# Altium schematic symbol library LED-Optocupler.SchLib: 114 symbols (part 2 of 2)
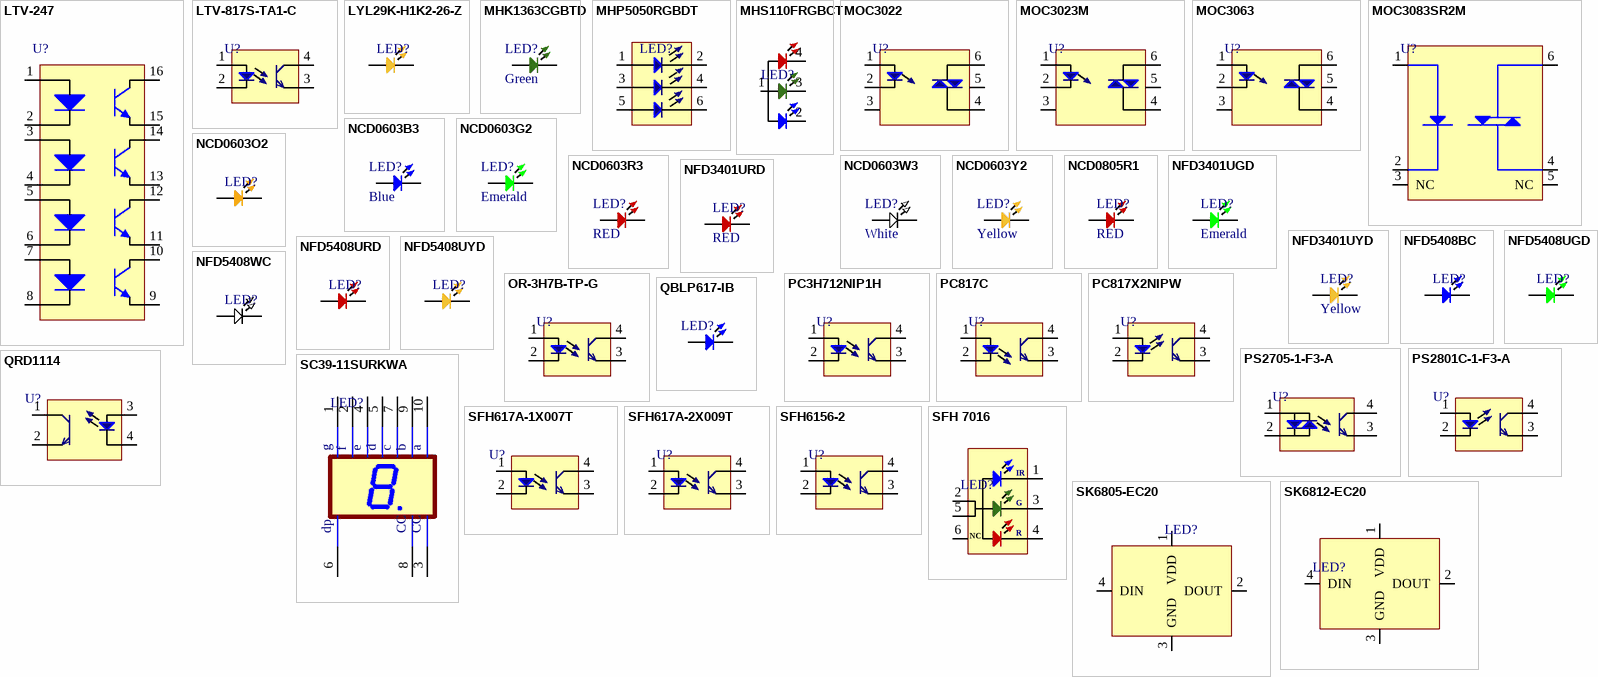
[diagram p3: symbols LTV-247 to SK6812-EC20]

## NCD0603O2
designator LED?
20mA 100mcd~220mcd 600nm~610nm -30℃~+85℃ Orange 130° 65mW 1.6V~2.6V 0603 Light Emitting Diodes (LED) ROHS; Manufacturer: FOSHAN Nationstar Optoelectronics; Manufacturer Part Number: NCD0603O2; Supplier: LCSC; LCSC Part Number: C108553; RoHS: No; Item Type: LED
footprint LED-0603
pins: 1, 2

## NCD0603R3
designator LED?, comment RED
RED LED 0603 Light Emitting Diodes; Manufacturer: Foshan NationStar Optoelectronics; Manufacturer Part Number: NCD0603R3; Package: 0603; Item Type: LED; LCSC Part Number: C3151730; ComponentLink1Description: LCSC; ComponentLink1URL: https://www.lcsc.com/product-detail/Light-Emitting-Diodes-LED_Foshan-NationStar-Optoelectronics-NCD0603R3_C3151730.html
footprint LED-0603
pins: 1, 2

## NCD0603W3
designator LED?, comment White
White light 0603 Light Emitting Diodes (LED) ROHS; Manufacturer: Foshan NationStar Optoelectronics; Manufacturer Part Number: NCD0603W3; Package: 0603; LCSC Part Number: C158100; Item Type: LED; ComponentLink1Description: LCSC; ComponentLink1URL: https://www.lcsc.com/product-detail/Light-Emitting-Diodes-LED_Foshan-NationStar-Optoelectronics-NCD0603W3_C158100.html
footprint LED-0603
pins: 1, 2

## NCD0603Y2
designator LED?, comment Yellow
yellow 0603 Light Emitting Diodes (LED) ROHS; Manufacturer: Foshan NationStar Optoelectronics; Manufacturer Part Number: NCD0603Y2; Package: 0603; LCSC Part Number: C89811; Item Type: LED; ComponentLink1Description: LCSC; ComponentLink1URL: https://www.lcsc.com/product-detail/Light-Emitting-Diodes-LED_Foshan-NationStar-Optoelectronics-NCD0603Y2_C89811.html
footprint LED-0603
pins: 1, 2

## NCD0805R1
designator LED?, comment RED
20mA 无色透明透镜 67mcd~195mcd -30℃~+85℃ 615nm~630nm 独立二极管 Red 130° 65mW 1.6V~2.6V 0805 Light Emitting Diodes (LED) ROHS; Manufacturer: FOSHAN Nationstar Optoelectronics; Manufacturer Part Number: NCD0805R1; Supplier: LCSC; LCSC Part Number: C84256; RoHS: No; Item Type: LED
footprint LED-0805
pins: 1, 2

## NFD3401UGD
designator LED?, comment Emerald
515nm~525nm -30℃~+85℃ Emerald 30° 200mW Plugin,D=3mm Light Emitting Diodes (LED) ROHS; Manufacturer: Foshan NationStar Optoelectronics; Manufacturer Part Number: NFD3401UGD; Package: Plugin,D=3mm; LCSC Part Number: C20618151; Item Type: LED; ComponentLink1Description: LCSC; ComponentLink1URL: https://www.lcsc.com/product-detail/Light-Emitting-Diodes-LED_Foshan-NationStar-Optoelectronics-NFD3401URD_C20618148.html
footprint TH LED 3mm_
pins: 1 -, 2 +

## NFD3401URD
designator LED?, comment RED
620nm~630nm -30℃~+85℃ Red 30° 200mW Plugin,D=3mm Light Emitting Diodes (LED) ROHS; Manufacturer: Foshan NationStar Optoelectronics; Manufacturer Part Number: NFD3401URD; Package: Plugin,D=3mm; LCSC Part Number: C20618148; Item Type: LED; ComponentLink1Description: LCSC; ComponentLink1URL: https://www.lcsc.com/product-detail/Light-Emitting-Diodes-LED_Foshan-NationStar-Optoelectronics-NFD3401URD_C20618148.html
footprint TH LED Red 3MM
pins: 1, 2

## NFD3401UYD
designator LED?, comment Yellow
585nm~595nm -30℃~+85℃ Yellow 30° 200mW Plugin,D=3mm Light Emitting Diodes (LED) ROHS; Manufacturer: Foshan NationStar Optoelectronics; Manufacturer Part Number: NFD3401UYD; Package: Plugin,D=3mm; LCSC Part Number: C20618149; Item Type: LED; ComponentLink1Description: LCSC; ComponentLink1URL: https://www.lcsc.com/product-detail/Light-Emitting-Diodes-LED_Foshan-NationStar-Optoelectronics-NFD3401UYD_C20618149.html
footprint TH LED Yellow 3MM
pins: 1, 2

## NFD5408BC
designator LED?
460nm~470nm -30℃~+85℃ Blue 20° 200mW Plugin,D=5mm LED Indication - Discrete ROHS; Manufacturer: Foshan; Manufacturer Part Number: NFD5408BC; Package: Plugin,D=5mm; LCSC Part Number: C20618158; Item Type: LED; ComponentLink1Description: LCSC; ComponentLink1URL: https://www.lcsc.com/product-detail/LED-Indication-Discrete_Foshan-NationStar-Optoelectronics-NFD5408BC_C20618158.html
footprint TH LED 5mm Blue
pins: 1, 2

## NFD5408UGD
designator LED?
515nm~525nm -30℃~+85℃ Emerald 30° 200mW Plugin,D=5mm LED Indication - Discrete ROHS; Manufacturer: Foshan; Manufacturer Part Number: NFD5408UGD; Package: Plugin,D=5mm; LCSC Part Number: C20618157; Item Type: LED; ComponentLink1Description: LCSC; ComponentLink1URL: https://www.lcsc.com/product-detail/LED-Indication-Discrete_Foshan-NationStar-Optoelectronics-NFD5408UGD_C20618157.html
footprint TH LED 5mm Green
pins: 1, 2

## NFD5408URD
designator LED?
620nm~630nm -30℃~+85℃ Red 30° 200mW Plugin,D=5mm LED Indication - Discrete ROHS; Manufacturer: Foshan; Manufacturer Part Number: NFD5408URD; Package: Plugin,D=5mm; LCSC Part Number: C20618154; Item Type: LED; ComponentLink1Description: LCSC; ComponentLink1URL: https://www.lcsc.com/product-detail/LED-Indication-Discrete_Foshan-NationStar-Optoelectronics-NFD5408URD_C20618154.html
footprint TH LED 5mm_
pins: 1, 2

## NFD5408UYD
designator LED?
585nm~595nm -30℃~+85℃ Yellow 30° 200mW Plugin,D=5mm LED Indication - Discrete ROHS; Manufacturer: Foshan; Manufacturer Part Number: NFD5408UYD; Package: Plugin,D=5mm; LCSC Part Number: C20618155; Item Type: LED; ComponentLink1Description: LCSC; ComponentLink1URL: https://www.lcsc.com/product-detail/LED-Indication-Discrete_Foshan-NationStar-Optoelectronics-NFD5408UYD_C20618155.html
footprint TH LED 5mm Yellow
pins: 1, 2

## NFD5408WC
designator LED?
-30℃~+85℃ White 20° 200mW Plugin,D=5mm LED Indication - Discrete ROHS; Manufacturer: Foshan; Manufacturer Part Number: NFD5408WC; Package: Plugin,D=5mm; LCSC Part Number: C20618159; Item Type: LED; ComponentLink1Description: LCSC; ComponentLink1URL: https://www.lcsc.com/product-detail/LED-Indication-Discrete_Foshan-NationStar-Optoelectronics-NFD5408WC_C20618159.html
footprint TH LED 5mm White
pins: 1, 2

## OR-3H7B-TP-G
designator U?
80V 3750V 2us@2mA,100Ω -55℃~+125℃ 50mA 3us@2mA,100Ω 0.4V@2.4mA,8mA 1 6V 1.2V Phototransistor DC SOP-4-2.6mm Optocouplers - Phototransistor Output ROHS; Manufacturer: Orient; Manufacturer Part Number: OR-3H7B-TP-G; Package: SOP-4-2.6mm; LCSC Part Number: C282477; Item Type: Optocoupler; ComponentLink1Description: LCSC; ComponentLink1URL: https://www.lcsc.com/product-detail/Optocouplers-Phototransistor-Output_Orient-OR-3H7B-TP-G_C282477.html
footprint SOP-4-1.27mm pitch Body 2.6mm
pins: 1 An, 2 Ca, 3 E, 4 C

## PC3H712NIP1H
designator U?
OPTOISO 2.5KV TRANS 4-MINI-FLAT; Manufacturer: Sharp; Manufacturer Part Number: PC3H712NIP1H; Item Type: Optocouplers; Collector Emitter Breakdown Voltage: 80V; Current Transfer Ratio: 500%; Dark Current: 100nA; Forward Current: 10mA; Number of Elements: 1; Supplier: Arrow Electronics; LCSC Part Number: C17651788; RoHS: Compliant; Stock: 14000; Pricing: 10500=0.3023, 14000=0.301 (USD); Contact Plating: Tin Bismuth; Isolation Voltage: 2.5kV; Lifecycle Status: Production; Max Operating Temperature: 100°C; Min Operating Temperature: -30°C; REACH SVHC: Yes; ComponentLink1URL: https://datasheet.octopart.com:443/PC3H712NIP1H-Sharp-datasheet-180743902.pdf?src-supplier=IHS; ComponentLink1Description: https://datasheet.octopart.com:443/PC3H712NIP1H-Sharp-datasheet-180743902.pdf?src-supplier=IHS; ComponentLink2URL: https://datasheet.octopart.com:443/PC3H712NIP1H-SOCLE-Technology-datasheet-109991809.pdf?src-supplier=Future+Electronics; ComponentLink2Description: https://datasheet.octopart.com:443/PC3H712NIP1H-SOCLE-Technology-datasheet-109991809.pdf?src-supplier=Future+Electronics
footprint PC3H712NIP1H
pins: 1 An, 2 Ca, 3 E, 4 C

## PC817C
designator U?
70V 5kV 50mA 100mV@1mA,20mA 1 6V 1.2V DC SMD-4 Transistor Output Optocoupler ROHS; Manufacturer: Slkor; Manufacturer Part Number: PC817C; Item Type: IC; Package: SMD-4; LCSC Part Number: C2936043; ComponentLink1Description: LCSC; ComponentLink1URL: https://www.lcsc.com/product-detail/Transistor-Output-Optocoupler_Slkor-SLKORMICRO-Elec-PC817C_C2936043.html
footprint PC817C
pins: 1 An, 2 Ca, 3 E, 4 C

## PC817X2NIPW
designator U?
Optoisolator Output Channel 4-SMD; Manufacturer: Sharp; Manufacturer Part Number: PC817X2NIPW; Item Type: IC; Supplier: Mouser; Supplier Part Number: 852-PC817X2NIPW; RoHS: No; Pricing: 1=0.54, 10=0.352, 50=0.352, 100=0.233, 1000=0.185, 10000=0.146 (USD); LCSC Part Number: C2840443
footprint PC817X2NIPW
pins: 1 An, 2 Ca, 3 E, 4 C

## PS2705-1-F3-A
designator U?
Optocoupler, Transistor, 3.75Kv, Sop-4 Rohs Compliant: Yes; Manufacturer: Renesas; Manufacturer Part Number: PS2705-1-F3-A; Number of Channels: 1; Max Power Dissipation: 150mW; Max Collector Current: 80mA; Collector Emitter Voltage (VCEO): 40V; Collector Emitter Saturation Voltage: 300mV; Forward Voltage: 1.4V; Max Input Current: 50mA; Rise Time: 3us; Current Transfer Ratio: 300%; Input Type: AC; Supplier 1: Digi-Key; RoHS: Yes; Category: Optocouplers; Stock 1: 58368; Pricing 1: 1=0.99000, 10=0.64600, 100=0.42290, 1000=0.35070 (USD); Mount: Surface Mount; Case/Package: SOP; Number of Pins: 4; Min Operating Temperature: -55°C; Max Operating Temperature: 100°C; Isolation Voltage: 3.75kV; Packaging: Tape and Reel; Number of Circuits: 1; Output Voltage: 40V; Number of Elements: 1; Forward Current: 50mA; Power Dissipation: 150mW; Radiation Hardening: No; Lead Free: Lead Free; RoHS Compliant: Yes; ComponentLink1URL: https://datasheet.ciiva.com/15119/getdatasheetpartid-627104-15119353.pdf?src-supplier=Verical; ComponentLink1Description: https://datasheet.ciiva.com/15119/getdatasheetpartid-627104-15119353.pdf?src-supplier=Verical; Supplier Part Number 1: 559-1030-1-ND; LCSC Part Number: C367377; Item Type: Optocoupler
footprint SOP-4_2.54
pins: 1 An, 2 Ca, 3 E, 4 C

## PS2801C-1-F3-A
designator U?
TransistorOptocouplers DC 1 2500Vrms SOP-4_P1.27 Optocouplers RoHS; Manufacturer: RENESAS; Manufacturer Part Number: PS2801C-1-F3-A; Footprint: SOP-4_1.27; ComponentLink1Description: LCSC; ComponentLink1URL: https://www.lcsc.com/product-detail/Optocouplers-Phototransistor-Output_RENESAS-PS2801C-1-F3-A_C67112.html; LCSC Part Number: C67112
footprint SOP-4_1.27
pins: 1 An, 2 Ca, 3 E, 4 C

## QBLP617-IB
designator LED?
LED BLUE CLEAR 0602 SMD R/A; Manufacturer: QT Brightek; Manufacturer Part Number: QBLP617-IB; Description: LED Uni-Color Blue 2-Pin Chip 0602(1605Metric) T/R; Item Type: LEDs; Forward Current: 20mA; Forward Voltage: 3.1V; Luminous Intensity: 63mcd; Number of Circuits: 1; Power Dissipation: 111mW; Reverse Voltage: 5V; Shape: Rectangular; Viewing Angle: 140°; Wavelength: 470nm; Supplier: Arrow Electronics; Supplier Part Number: QBLP617-IB; RoHS: Compliant; Stock: 1867; Pricing: 1=0.0007 (USD); Case/Package: 0602; Color: Blue; Height: 600µm; Max Operating Temperature: 80°C; Min Operating Temperature: -40°C; Mounting Technology: Surface Mount; Number of Terminals: 2; REACH SVHC: Yes; Schedule B: 8541402000, 8541402000|8541402000|8541402000|8541402000|8541402000, 8541410000; Terminal Pitch: 2.1mm; ComponentLink1URL: https://datasheet.octopart.com:443/QBLP617-IB-QT-Brightek-datasheet-140961254.pdf?src-supplier=IHS; ComponentLink1Description: https://datasheet.octopart.com:443/QBLP617-IB-QT-Brightek-datasheet-140961254.pdf?src-supplier=IHS
footprint LED-0603
pins: 1, 2

## QRD1114
designator U?
SENSR OPTO TRANS 1.27MM REFL PCB; Manufacturer: ON Semiconductor / Fairchild; Manufacturer Part Number: QRD1114; Wavelength: 940nm; Forward Current: 50mA; Rise Time: 10000ns; Forward Voltage: 1.7V; Collector Emitter Voltage (VCEO): 30V; Max Collector Current: 1mA; Fall Time: 50000ns; Output Type: Phototransistor; Number of Channels: 1; Reverse Breakdown Voltage: 5V; Response Time: 50us; Power Dissipation: 100mW; Input Current: 20mA; Supplier 1: Digi-Key; RoHS: Yes; Category: Optocouplers; Stock 1: 4356; Pricing 1: 1=1.64000, 5=1.58000, 10=1.28400, 25=1.10600, 50=0.95780, 100=0.86900, 500=0.73076, 1000=0.65175, 5000=0.59250 (USD); Mount: Through Hole; Number of Pins: 4; Weight: 0g; Contact Plating: Tin,Matte; Min Operating Temperature: -40°C; Max Operating Temperature: 85°C; Packaging: Bulk; Package Quantity: 100; Sensing Distance: 1.27mm; Reverse Voltage (DC): 5V; Collector Emitter Breakdown Voltage: 30V; Number of Elements: 1; Operating Supply Voltage: 1.7V; Max Power Dissipation: 100mW; Length: 6.1mm; Width: 4.39mm; Height: 4.65mm; Radiation Hardening: No; Lead Free: Lead Free; REACH SVHC: No SVHC; ComponentLink1URL: https://datasheet.ciiva.com/12069/qrd1114-192054-12069087.pdf?src-supplier=Mouser; ComponentLink1Description: https://datasheet.ciiva.com/12069/qrd1114-192054-12069087.pdf?src-supplier=Mouser; ComponentLink2URL: https://datasheet.ciiva.com/19453/874939-19453556.pdf?src-supplier=Jameco; ComponentLink2Description: https://datasheet.ciiva.com/19453/874939-19453556.pdf?src-supplier=Jameco; ComponentLink3URL: https://datasheet.ciiva.com/2823/qrd1113-2823879.pdf?src-supplier=Digi-Key; ComponentLink3Description: https://datasheet.ciiva.com/2823/qrd1113-2823879.pdf?src-supplier=Digi-Key; ComponentLink4URL: https://datasheet.ciiva.com/26165/qrd1113-26165833.pdf?src-supplier=Avnet+Europe; ComponentLink4Description: https://datasheet.ciiva.com/26165/qrd1113-26165833.pdf?src-supplier=Avnet+Europe; ComponentLink5URL: https://datasheet.ciiva.com/3305/qrd1113-3305733.pdf?src-supplier=Avnet; ComponentLink5Description: https://datasheet.ciiva.com/3305/qrd1113-3305733.pdf?src-supplier=Avnet; ComponentLink6URL: https://datasheet.ciiva.com/17088/qrd1113-17088344.pdf?src-supplier=Future+Electronics; ComponentLink6Description: https://datasheet.ciiva.com/17088/qrd1113-17088344.pdf?src-supplier=Future+Electronics; Supplier Part Number 1: QRD1114-ND; LCSC Part Number: C258245
footprint QRD1114_
pins: 1 C, 2 E, 3 An, 4 Ca

## SC39-11SURKWA
designator LED?
DISPLAY 7SEG 0.39" SGL RED 10DIP; Manufacturer: Kingbright; Manufacturer Part Number: SC39-11SURKWA; Item Type: LED Displays; Supplier: Digikey; Supplier Part Number: SC39-11SURKWA-ND; RoHS: Yes; Stock: 3214; Pricing: 1=1.86, 39=1.23821, 117=0.95282, 507=0.86132, 1014=0.74021, 2028=0.69983, 5031=0.68368, 10023=0.67291 (USD); ComponentLink1URL: https://datasheet.ciiva.com/26291/sc39-11surkwa-26291740.pdf?src-supplier=Digikey; ComponentLink1Description: https://datasheet.ciiva.com/26291/sc39-11surkwa-26291740.pdf?src-supplier=Digikey; ComponentLink2URL: https://datasheet.ciiva.com/16375/sc39-11surkwa-246106-16375578.pdf?src-supplier=Mouser; ComponentLink2Description: https://datasheet.ciiva.com/16375/sc39-11surkwa-246106-16375578.pdf?src-supplier=Mouser; ComponentLink3URL: https://datasheet.ciiva.com/1317/1519922-1317612.pdf?src-supplier=Newark; ComponentLink3Description: https://datasheet.ciiva.com/1317/1519922-1317612.pdf?src-supplier=Newark; ComponentLink4URL: https://datasheet.ciiva.com/29367/001050548-da-01-en-led-anzeige-7-seg-rot-sc39-11surkwa-29367379.pdf?src-supplier=Conrad; ComponentLink4Description: https://datasheet.ciiva.com/29367/001050548-da-01-en-led-anzeige-7-seg-rot-sc39-11surkwa-29367379.pdf?src-supplier=Conrad; ComponentLink5URL: https://datasheet.ciiva.com/1535/1519922-1535149.pdf?src-supplier=Element14; ComponentLink5Description: https://datasheet.ciiva.com/1535/1519922-1535149.pdf?src-supplier=Element14
footprint SC39-11SURKWA
pins: 1 G, 2 F, 3 CC@1, 4 E, 5 D, 6 DP, 7 C, 8 CC, 9 B, 10 A
text: g; f; e; d; c; b; a; dp

## SFH617A-1X007T
designator U?
OPTOISOLATOR 5.3KV TRANS 4SMD; Manufacturer: Vishay Semiconductors; Manufacturer Part Number: SFH617A-1X007T; Max Power Dissipation: 150mW; Reverse Breakdown Voltage: 6V; Forward Voltage: 1.35V; Forward Current: 60mA; Number of Channels: 1; Collector Emitter Voltage (VCEO): 70V; Output Current per Channel: 50mA; Collector Emitter Saturation Voltage: 400mV; Max Collector Current: 100mA; Power Dissipation: 400mW; Current Transfer Ratio: 80%; Input Type: DC; Supplier 1: Digi-Key; RoHS: Yes; Category: Optocouplers; Stock 1: 899; Pricing 1: 1=1.12000, 10=0.73200, 100=0.47950 (USD); Mount: Surface Mount; Case/Package: SMD/SMT; Number of Pins: 4; Min Operating Temperature: -55°C; Max Operating Temperature: 110°C; Packaging: Tape and Reel; Package Quantity: 1000; Max Output Voltage: 70V; Max Input Current: 60mA; Number of Elements: 1; Collector-emitter Voltage-Max: 400mV; Radiation Hardening: No; RoHS Compliant: Yes; ComponentLink1URL: https://datasheet.ciiva.com/12239/sfh617a-12239406.pdf?src-supplier=Mouser; ComponentLink1Description: https://datasheet.ciiva.com/12239/sfh617a-12239406.pdf?src-supplier=Mouser; ComponentLink2URL: https://datasheet.ciiva.com/18616/options-18616574.pdf?src-supplier=Digi-Key; ComponentLink2Description: https://datasheet.ciiva.com/18616/options-18616574.pdf?src-supplier=Digi-Key; Supplier Part Number 1: 751-SFH617A-1X007TCT-ND; Item Type: OPTOISOLATOR
footprint 4-SMD  (SFH617A-1X007T)
pins: 1 An, 2 Ca, 3 E, 4 C

## SFH617A-2X009T
designator U?
OPTOISOLATOR 5.3KV TRANS 4SMD; Manufacturer: Vishay; Manufacturer Part Number: SFH617A-2X009T; Item Type: IC; Supplier: Arrow Electronics; LCSC Part Number: C5334420; RoHS: Yes; Stock: 871; Pricing: 1=0.3234, 10=0.3216, 25=0.3197, 100=0.3179, 250=0.3161, 500=0.3142 (USD); ComponentLink1URL: https://datasheet.ciiva.com/18616/options-18616575.pdf?src-supplier=Digikey; ComponentLink1Description: https://datasheet.ciiva.com/18616/options-18616575.pdf?src-supplier=Digikey
footprint SFH617A-2X009T
pins: 1 An, 2 Ca, 3 E, 4 C

## SFH6156-2
designator U?
OPTOISOLATOR 5.3KV TRANS 4SMD; Manufacturer: Vishay; Manufacturer Part Number: SFH6156-2; Item Type: IC; Supplier: Mouser; LCSC Part Number: C5156027; RoHS: No; Stock: 11480; Pricing: 1=0.56, 10=0.37, 50=0.37, 100=0.253, 1000=0.218, 10000=0.217 (USD)
footprint SFH6156-2
pins: 1 An, 2 Ca, 3 E, 4 C

## SFH 7016
designator LED?
Infrared Emitters Green / Red / IR LED 530nm, 655nm, 940nm; Manufacturer: Osram Opto; Item Type: LEDs; Color: 49,52Colour; Forward Current: 20mA; Reverse Voltage: 5V; Viewing Angle: 120°; Supplier: Mouser; Supplier Part Number: 720-SFH7016; Manufacturer Part Number: SFH 7016; RoHS: Yes; Stock: 14170; Pricing: 1=1.67, 10=1.06, 50=1.06, 100=0.782, 1000=0.696, 10000=0.637 (USD); Min Operating Temperature: -40°C; Max Operating Temperature: 85°C; Length: 2.5mm; Width: 1.6mm; Height: 550um
footprint SFH 7016
pins: 1 IR, 2 +, 3 G, 4 R, 5 +, 6 NC

## SK6805-EC20
designator LED?
SMD,2x2mm RGB LEDs(Built-in IC) ROHS; Manufacturer: OPSCO Optoelectronics; Manufacturer Part Number: SK6805-EC20; Item Type: LED; Package: SMD,2x2mm; LCSC Part Number: C2890036; ComponentLink1Description: LCSC; ComponentLink1URL: https://www.lcsc.com/product-detail/RGB-LEDs-Built-in-IC_OPSCO-Optoelectronics-SK6805-EC20_C2890036.html?s_z=n_sk6805
footprint SK6805-EC20
pins: 1 VDD, 2 DOUT, 3 GND, 4 DIN

## SK6812-EC20
designator LED?
5mA -40℃~+80℃ RGB SMD,2x2mm Light Emitting Diodes (LED) ROHS; Manufacturer: OPSCO Optoelectronics; Manufacturer Part Number: SK6812-EC20; Item Type: RGB LED; Package: SMD,2x2mm; LCSC Part Number: C2909058; ComponentLink1Description: LCSC; ComponentLink1URL: https://www.lcsc.com/product-detail/Light-Emitting-Diodes-LED_OPSCO-Optoelectronics-SK6812-EC20_C2909058.html
footprint SK6812-EC20
pins: 1 VDD, 2 DOUT, 3 GND, 4 DIN

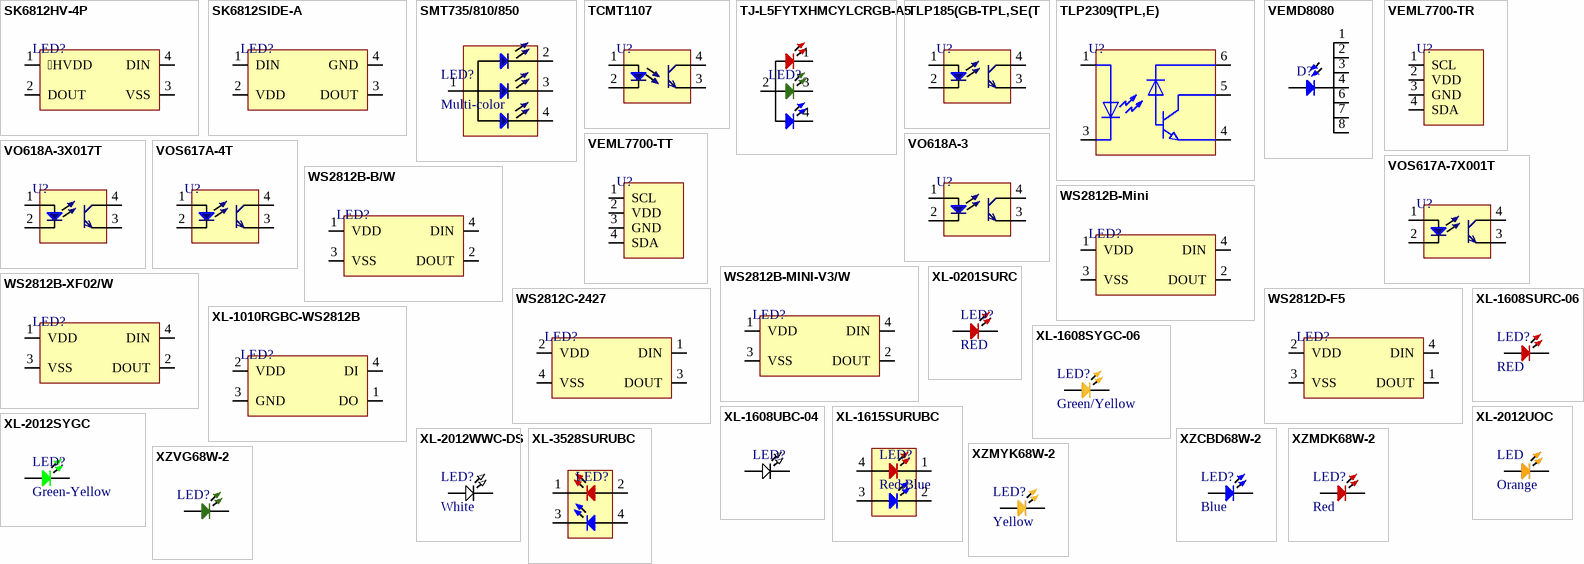
[diagram p2: symbols SK6812HV-4P to XZVG68W-2]

## SK6812HV-4P
designator LED?
SMD-4P,5.4x5mm Light Emitting Diodes (LED) ROHS; Manufacturer: OPSCO Optoelectronics; Manufacturer Part Number: SK6812HV-4P; Package: SMD-4P,5.4x5mm; LCSC Part Number: C5378729; ComponentLink1Description: LCSC; ComponentLink1URL: https://www.lcsc.com/product-detail/Light-Emitting-Diodes-LED_OPSCO-Optoelectronics-SK6812HV-4P_C5378729.html; Item Type: LED
footprint SK6812HV-4P
pins: 1 HVDD, 2 DOUT, 3 VSS, 4 DIN

## SK6812SIDE-A
designator LED?
SMD-4P,1.6x4mm Light Emitting Diodes (LED) ROHS; Manufacturer: OPSCO Optoelectronics; Manufacturer Part Number: SK6812SIDE-A; Item type: Addressable RGB LED; ComponentLink1Description: LCSC; ComponentLink1URL: https://www.lcsc.com/product-detail/Light-Emitting-Diodes-LED_OPSCO-Optoelectronics-SK6812SIDE-A_C5378721.html; Package: SMD-4P,1.6x4mm; LCSC Part Number: C5378721
footprint SK6812SIDE-A (SMD-4P,1.6x4mm Light Emitting Diodes (LED) ROHS)
pins: 1 DIN, 2 VDD, 3 DOUT, 4 GND

## SMT735/810/850
designator LED?, comment Multi-color
High Performance Multi-color TOP LED; Manufacturer: Marubeni; Manufacturer Part no: SMT735/810/850; Package: Custom; ComponentLink1Description: Datasheet; ComponentLink1URL: https://tech-led.com/wp-content/uploads/2019/04/SMT735_810_850.pdf; Item Type: LED
footprint SMT735/810/850
pins: 1 -, 2 -, 3 -, 4 -

## TCMT1107
designator U?
OPTOISOLATOR 3.75KV TRANS 4-SOP; Manufacturer: Vishay Semiconductors; Manufacturer Part Number: TCMT1107; Item Type: Optocouplers; Voltage Rating (DC): 70V; Turn-Off Delay Time: 4us; Turn-On Delay Time: 1.5us; Supplier: Mouser; LCSC Part Number: C81148; RoHS: Yes; Stock: 27846; Pricing: 1=0.6, 10=0.386, 50=0.386, 100=0.26, 1000=0.203, 10000=0.163 (USD); Height: 2.3mm; Lead Free: 5697LeadFree; RoHS Compliant: 5897YesNo; ComponentLink1URL: https://datasheet.ciiva.com/11772/0900766b80e30939-11772485.pdf?src-supplier=Rs; ComponentLink1Description: https://datasheet.ciiva.com/11772/0900766b80e30939-11772485.pdf?src-supplier=Rs; ComponentLink2URL: https://datasheet.ciiva.com/27051/1107109-27051440.pdf?src-supplier=Jameco; ComponentLink2Description: https://datasheet.ciiva.com/27051/1107109-27051440.pdf?src-supplier=Jameco; ComponentLink3URL: https://datasheet.ciiva.com/8040/485045-8040879.pdf?src-supplier=Element14; ComponentLink3Description: https://datasheet.ciiva.com/8040/485045-8040879.pdf?src-supplier=Element14; ComponentLink4URL: https://datasheet.ciiva.com/14079/tcmt1100-14079945.pdf?src-supplier=Digikey; ComponentLink4Description: https://datasheet.ciiva.com/14079/tcmt1100-14079945.pdf?src-supplier=Digikey; ComponentLink5URL: https://datasheet.ciiva.com/14079/tcmt1100-14079946.pdf?src-supplier=Digikey; ComponentLink5Description: https://datasheet.ciiva.com/14079/tcmt1100-14079946.pdf?src-supplier=Digikey; ComponentLink6URL: https://datasheet.ciiva.com/8092/tcmt1100-8092285.pdf?src-supplier=Avnet; ComponentLink6Description: https://datasheet.ciiva.com/8092/tcmt1100-8092285.pdf?src-supplier=Avnet; ComponentLink7URL: https://datasheet.ciiva.com/12088/tcmt1100-103040-12088638.pdf?src-supplier=Mouser; ComponentLink7Description: https://datasheet.ciiva.com/12088/tcmt1100-103040-12088638.pdf?src-supplier=Mouser
footprint SOP-4-1.27mm pitch Body 2.6mm
pins: 1 An, 2 Ca, 3 E, 4 C

## TJ-L5FYTXHMCYLCRGB-A5
designator LED?
RGB 5mm圆形灯头 Plugin,D=5mm Light Emitting Diodes (LED) ROHS; Manufacturer: TOGIALED; Manufacturer Part Number: TJ-L5FYTXHMCYLCRGB-A5; Package: Plugin,D=5mm; LCSC Part Number: C331057; Item Type: LED; ComponentLink1Description: LCSC; ComponentLink1URL: https://www.lcsc.com/product-detail/Light-Emitting-Diodes-LED_TOGIALED-TJ-L5FYTXHMCYLCRGB-A5_C331057.html
footprint TJ-L5FYTXHMCYLCRGB-A5
pins: 1 -RED, 2 +, 3 -GREEN, 4 -BLUE

## TLP185(GB-TPL,SE(T
designator U?
80V 3.75kV 50mA 300mV@2.4mA,8mA 1 5V 1.25V DC SOP-4-2.54mm Transistor Output Optocoupler ROHS; Manufacturer: TOSHIBA; Manufacturer Part Number: TLP185(GB-TPL,SE(T; Package: SOP-4-2.54mm; LCSC Part Number: C7240; Item Type: Optocoupler; ComponentLink1Description: LCSC; ComponentLink1URL: https://www.lcsc.com/product-detail/Transistor-Output-Optocoupler_TOSHIBA-TLP185-GB-TPL-SE-T_C7240.html
footprint SOP-4_2.54
pins: 1 An, 2 Ca, 3 E, 4 C

## TLP2309(TPL,E)
designator U?
OPTOISO 3.75KV TRANS 6-SO 5 LEAD; Manufacturer: Toshiba; Manufacturer Part Number: TLP2309(TPL,E); Item Type: IC; Number of Channels: 1; Max Output Voltage: 20V; Output Current per Channel: 8mA; Max Power Dissipation: 40mW; Forward Current: 10mA; Data Rate: 1Mbps; Forward Voltage: 1.55V; Reverse Voltage (DC): 5V; Current Transfer Ratio: 15%; Supplier: Digikey; LCSC Part Number: C85066; RoHS: Yes; Stock: 14425; Pricing: 1=1.26, 10=0.886, 100=0.6614, 500=0.56162, 1000=0.52899 (USD); Mounting Technology: Surface Mount; Case/Package: SO; Min Operating Temperature: -40°C; Max Operating Temperature: 110°C; Packaging: Tape and Reel; Package Quantity: 1; Output Current: 8mA; ComponentLink1URL: https://datasheet.ciiva.com/46635/tlp2309-datasheet-en-20150312-46635594.pdf?src-supplier=Digikey; ComponentLink1Description: https://datasheet.ciiva.com/46635/tlp2309-datasheet-en-20150312-46635594.pdf?src-supplier=Digikey; ComponentLink2URL: https://datasheet.ciiva.com/41859/tlp2309-datasheet-en-20150312-41859932.pdf?src-supplier=Digikey; ComponentLink2Description: https://datasheet.ciiva.com/41859/tlp2309-datasheet-en-20150312-41859932.pdf?src-supplier=Digikey; ComponentLink3URL: https://datasheet.ciiva.com/41859/tlp2309-datasheet-en-20150312-41859931.pdf?src-supplier=Digikey; ComponentLink3Description: https://datasheet.ciiva.com/41859/tlp2309-datasheet-en-20150312-41859931.pdf?src-supplier=Digikey; ComponentLink4URL: https://datasheet.ciiva.com/41859/tlp2309-datasheet-en-20150312-41859933.pdf?src-supplier=Digikey; ComponentLink4Description: https://datasheet.ciiva.com/41859/tlp2309-datasheet-en-20150312-41859933.pdf?src-supplier=Digikey
footprint SO-6
pins: 1 AN, 3 CA, 4 GND, 5 VO, 6 VCC

## VEMD8080
designator D?
VEMD Series 850 nM ±65° Surface Mount Silicon PIN Photodiode; Manufacturer: Vishay Semiconductors; Manufacturer Part Number: VEMD8080; Item Type: Photodiodes; Supplier: Mouser; LCSC Part Number: C511402; Stock: 45223; Pricing: 1=2.18, 10=1.51, 50=1.51, 100=1.16, 1000=0.89, 10000=0.796 (USD); ComponentLink1URL: https://www.vishay.com/docs/84565/vemd8080.pdf?src-supplier=Digikey; ComponentLink1Description: https://www.vishay.com/docs/84565/vemd8080.pdf?src-supplier=Digikey; ComponentLink2URL: https://datasheet.octopart.com/VEMD8080-Vishay-datasheet-117816384.pdf?src-supplier=Future+Electronics; ComponentLink2Description: https://datasheet.octopart.com/VEMD8080-Vishay-datasheet-117816384.pdf?src-supplier=Future+Electronics
footprint VEMD8080
pins: 1 C, 2 C, 3 C, 4 C, 5 A, 6 C, 7 C, 8 C

## VEML7700-TR
designator U?
SENSOR OPT 545NMAMB 4 SMD J LEAD; Manufacturer: Vishay; Manufacturer Part Number: VEML7700-TR; Item Type: Optical Sensors; Wavelength: 545nm; Min Supply Voltage (DC): 2.5V; Max Supply Voltage (DC): 3.6V; Output Type: I2C; Supplier: Mouser; LCSC Part Number: C504893; RoHS: Yes; Stock: 53215; Pricing: 1=0.95, 10=0.814, 50=0.814, 100=0.748, 1000=0.646, 10000=0.615 (USD); Mounting Technology: Surface Mount; Case/Package: SMD/SMT; Min Operating Temperature: -25°C; Max Operating Temperature: 85°C; Packaging: Cut Tape; Series: -; Max Supply Voltage: 3.6V; Min Supply Voltage: 2.5V; Height: 3.15mm; Lead Free: Lead Free; RoHS Compliant: Yes; Reach SVHC Compliant: Unknown; ComponentLink1URL: https://media.digikey.com/pdf/Data%20Sheets/Vishay%20Semiconductors/VEML7700.pdf?src-supplier=Digikey; ComponentLink1Description: https://media.digikey.com/pdf/Data%20Sheets/Vishay%20Semiconductors/VEML7700.pdf?src-supplier=Digikey; ComponentLink2URL: http://www.farnell.com/datasheets/2245216.pdf?_ga=2.264302671.1993437627.1504087681-454586224.1503288287&src-supplier=Farnell; ComponentLink2Description: http://www.farnell.com/datasheets/2245216.pdf?_ga=2.264302671.1993437627.1504087681-454586224.1503288287&src-supplier=Farnell; ComponentLink3URL: http://www.farnell.com/datasheets/2006002.pdf?src-supplier=Farnell; ComponentLink3Description: http://www.farnell.com/datasheets/2006002.pdf?src-supplier=Farnell; ComponentLink4URL: http://www.farnell.com/datasheets/2245216.pdf?_ga=2.264302671.1993437627.1504087681-454586224.1503288287&src-supplier=Newark; ComponentLink4Description: http://www.farnell.com/datasheets/2245216.pdf?_ga=2.264302671.1993437627.1504087681-454586224.1503288287&src-supplier=Newark; ComponentLink5URL: http://www.farnell.com/datasheets/2006002.pdf?src-supplier=Element14; ComponentLink5Description: http://www.farnell.com/datasheets/2006002.pdf?src-supplier=Element14
footprint VEML7700-TR
pins: 1 SCL, 2 VDD, 3 GND, 4 SDA

## VEML7700-TT
designator U?
SENSOR OPT AMBIENT 4 SMD J LEAD; Manufacturer: Vishay Semiconductors; Manufacturer Part Number: VEML7700-TT; Item Type: Sensors; Min Supply Voltage (DC): 2.5V; Max Supply Voltage (DC): 3.6V; Output Current: 3mA; Supplier: Mouser; LCSC Part Number: C1850416; RoHS: Yes; Stock: 116827; Pricing: 1=1.85, 10=1.26, 50=1.26, 100=0.955, 1000=0.772, 10000=0.667 (USD); Mounting Technology: Surface Mount; Case/Package: SMD/SMT; Packaging: Tape and Reel; Series: *; Reach SVHC Compliant: No; RoHS Compliant: Yes; ComponentLink1URL: http://www.farnell.com/datasheets/2118175.pdf?_ga=2.74067602.1265931949.1503988629-1413671594.1503025027&src-supplier=Farnell; ComponentLink1Description: http://www.farnell.com/datasheets/2118175.pdf?_ga=2.74067602.1265931949.1503988629-1413671594.1503025027&src-supplier=Farnell; ComponentLink2URL: http://www.farnell.com/datasheets/2118175.pdf?src-supplier=Element14; ComponentLink2Description: http://www.farnell.com/datasheets/2118175.pdf?src-supplier=Element14; ComponentLink3URL: http://www.farnell.com/datasheets/2118175.pdf?_ga=2.74067602.1265931949.1503988629-1413671594.1503025027&src-supplier=Newark; ComponentLink3Description: http://www.farnell.com/datasheets/2118175.pdf?_ga=2.74067602.1265931949.1503988629-1413671594.1503025027&src-supplier=Newark; ComponentLink4URL: http://www.vishay.com/docs/84286/veml7700.pdf?src-supplier=Digikey; ComponentLink4Description: http://www.vishay.com/docs/84286/veml7700.pdf?src-supplier=Digikey
footprint VEML7700-TT
pins: 1 SCL, 2 VDD, 3 GND, 4 SDA

## VO618A-3
designator U?
Optocoupler DC-IN 1-CH Transistor DC-OUT 4-Pin PDIP; Manufacturer: Vishay Semiconductors; Manufacturer Part Number: VO618A-3; Item Type: Optocouplers; Supplier: Digikey; LCSC Part Number: C142630; RoHS: Yes; Stock: 6419; Pricing: 1=0.46, 10=0.283, 100=0.1626, 1000=0.12726, 2000=0.11666, 5000=0.10605, 10000=0.09898, 25000=0.09544 (USD); ComponentLink1URL: https://datasheet.ciiva.com/26941/getdatasheetpartid-641306-26941970.pdf?src-supplier=Verical; ComponentLink1Description: https://datasheet.ciiva.com/26941/getdatasheetpartid-641306-26941970.pdf?src-supplier=Verical; ComponentLink2URL: https://datasheet.ciiva.com/2087/vo618a-2087569.pdf?src-supplier=Digikey; ComponentLink2Description: https://datasheet.ciiva.com/2087/vo618a-2087569.pdf?src-supplier=Digikey; ComponentLink3URL: https://datasheet.ciiva.com/8086/vo618a-8086102.pdf?src-supplier=Avnet; ComponentLink3Description: https://datasheet.ciiva.com/8086/vo618a-8086102.pdf?src-supplier=Avnet
footprint DIP-4
pins: 1 An, 2 Ca, 3 E, 4 C

## VO618A-3X017T
designator U?
OPTOISOLATOR 5.3KV TRANS 4-SMD; Manufacturer: Vishay Semiconductors; Manufacturer Part Number: VO618A-3X017T; Item Type: IC; Supplier: Mouser; LCSC Part Number: C143748; RoHS: Yes; Stock: 90870; Pricing: 1=0.37, 10=0.242, 50=0.242, 100=0.16, 1000=0.136, 10000=0.106 (USD); ComponentLink1URL: https://datasheet.ciiva.com/2087/vo618a-2087431.pdf?src-supplier=Digikey; ComponentLink1Description: https://datasheet.ciiva.com/2087/vo618a-2087431.pdf?src-supplier=Digikey; ComponentLink2URL: https://datasheet.ciiva.com/2087/vo618a-2087432.pdf?src-supplier=Digikey; ComponentLink2Description: https://datasheet.ciiva.com/2087/vo618a-2087432.pdf?src-supplier=Digikey; ComponentLink3URL: https://datasheet.ciiva.com/2087/vo618a-2087433.pdf?src-supplier=Digikey; ComponentLink3Description: https://datasheet.ciiva.com/2087/vo618a-2087433.pdf?src-supplier=Digikey
footprint 4-SMD  (SFH617A-1X007T)
pins: 1 An, 2 Ca, 3 E, 4 C

## VOS617A-4T
designator U?
OPTOISO 3.75KV 1CH TRANS 4-SSOP; Manufacturer: Vishay Semiconductors; Manufacturer Part Number: VOS617A-4T; Item Type: Optocouplers; Supplier: Arrow Electronics; LCSC Part Number: C4749236; RoHS: Yes; Stock: 6000; Pricing: 3000=0.1642, 6000=0.1638, 9000=0.1528, 15000=0.1513, 21000=0.1495, 30000=0.1428 (USD); ComponentLink1URL: https://datasheet.ciiva.com/14809/vos617a-14809107.pdf?src-supplier=Arrow+Electronics; ComponentLink1Description: https://datasheet.ciiva.com/14809/vos617a-14809107.pdf?src-supplier=Arrow+Electronics; ComponentLink2URL: https://datasheet.ciiva.com/30032/vos617a-30032543.pdf?src-supplier=Avnet; ComponentLink2Description: https://datasheet.ciiva.com/30032/vos617a-30032543.pdf?src-supplier=Avnet; ComponentLink3URL: https://datasheet.ciiva.com/18615/vos617a-18615995.pdf?src-supplier=Digikey; ComponentLink3Description: https://datasheet.ciiva.com/18615/vos617a-18615995.pdf?src-supplier=Digikey
footprint SOIC-4-175mil
pins: 1 An, 2 Ca, 3 E, 4 C

## VOS617A-7X001T
designator U?
OPTOISO 3.75KV 1CH TRANS 4-SSOP; Manufacturer: Vishay Semiconductors; Manufacturer Part Number: VOS617A-7X001T; Item Type: IC; Supplier: Mouser; LCSC Part Number: C2925139; RoHS: Yes; Stock: 33650; Pricing: 1=0.53, 10=0.368, 50=0.368, 100=0.211, 1000=0.193, 10000=0.151 (USD); ComponentLink1URL: https://datasheet.ciiva.com/30032/vos617a-30032526.pdf?src-supplier=Avnet; ComponentLink1Description: https://datasheet.ciiva.com/30032/vos617a-30032526.pdf?src-supplier=Avnet
footprint SOIC-4-175mil
pins: 1 An, 2 Ca, 3 E, 4 C

## WS2812B-B/W
designator LED?
RGB SMD5050 Light Emitting Diodes (LED) ROHS; Manufacturer: Worldsemi; Manufacturer Part Number: WS2812B-B/W; Item Type: RGB LED; Package: SMD5050; LCSC Part Number: C114586; ComponentLink1Description: LCSC; ComponentLink1URL: https://www.lcsc.com/product-detail/Light-Emitting-Diodes-LED_Worldsemi-WS2812B-B-W_C114586.html
footprint WS2812B-B/W
pins: 1 VDD, 2 DOUT, 3 VSS, 4 DIN

## WS2812B-Mini
designator LED?
SMD,3.5x3.5mm Light Emitting Diodes (LED) RoHS; Manufacturer: Worldsemi; Manufacturer Part Number: WS2812B-Mini; Item Type: RGB LED; ComponentLink1Description: LCSC; ComponentLink1URL: *https://lcsc.com/product-detail/Light-Emitting-Diodes-LED_Worldsemi-WS2812B-Mini_C527089.html; Package: SMD,3.5x3.5mm; LCSC Part Number: C527089
footprint WS2812B-Mini (SMD,3.5x3.5mm Light Emitting Diodes (LED) RoHS)
pins: 1 VDD, 2 DOUT, 3 VSS, 4 DIN

## WS2812B-MINI-V3/W
designator LED?
12mA RGB SMD3535 Light Emitting Diodes (LED) ROHS; Manufacturer: Worldsemi; Manufacturer Part Number: WS2812B-MINI-V3/W; Item Type: RGB  LED; Package: SMD3535; LCSC Part Number: C527089; ComponentLink1Description: LCSC; ComponentLink1URL: https://www.lcsc.com/product-detail/Light-Emitting-Diodes-LED_Worldsemi-WS2812B-MINI-V3-W_C527089.html
footprint SMD3535
pins: 1 VDD, 2 DOUT, 3 VSS, 4 DIN

## WS2812B-XF02/W
designator LED?
SMD5050 Light Emitting Diodes (LED) ROHS; Manufacturer: Worldsemi; Manufacturer Part Number: WS2812B-XF02/W; Item Type: RGB LED; Package: SMD5050; LCSC Part Number: C4154882; ComponentLink1Description: LCSC; ComponentLink1URL: https://www.lcsc.com/product-detail/Light-Emitting-Diodes-LED_Worldsemi-WS2812B-XF02-W_C4154882.html
footprint WS2812B-XF02/W
pins: 1 VDD, 2 DOUT, 3 VSS, 4 DIN

## WS2812C-2427
designator LED?
SMD,2.4x2.7mm RGB LEDs(Built-in IC) ROHS; Manufacturer: WORLDSEMI; Manufacturer Part Number: WS2812C-2427; Item Type: LED; Supplier: LCSC; LCSC Part Number: C4154872; RoHS: No
footprint WS2812C-2427
pins: 1 DIN, 2 VDD, 3 DOUT, 4 VSS

## WS2812D-F5
designator LED?
Plugin,D=5mm RGB LEDs ROHS; Manufacturer: Worldsemi; Manufacturer Part Number: WS2812D-F5; Item Type: RGB LED; Package: Plugin,D=5mm; LCSC Part Number: C190565; ComponentLink1Description: LCSC; ComponentLink1URL: https://jlcpcb.com/partdetail/Worldsemi-WS2812DF5/C190565
footprint WS2812D-F5
pins: 1 DOUT, 2 VDD, 3 VSS, 4 DIN

## XL-0201SURC
designator LED?, comment RED
40mcd~75mcd 透明透镜 620nm~630nm -30℃~+85℃ Positive post Red 120° 55mW 0201 Light Emitting Diodes (LED) ROHS; Manufacturer: XINGLIGHT; Manufacturer Part Number: XL-0201SURC; Package: 0201; LCSC Part Number: C3646923; Item Type: LED; ComponentLink1Description: LCSC; ComponentLink1URL: https://www.lcsc.com/product-detail/Light-Emitting-Diodes-LED_XINGLIGHT-XL-0201SURC_C3646923.html
footprint LED-0201
pins: 1, 2

## XL-1010RGBC-WS2812B
designator LED?
Colorless transparence -40℃~+150℃ 正贴 RGB 120° 1010 Light Emitting Diodes (LED) ROHS; Manufacturer: XINGLIGHT; Manufacturer Part Number: XL-1010RGBC-WS2812B; Item Type: RGB LED; Package: 1010; LCSC Part Number: C5349953; ComponentLink1Description: LCSC; ComponentLink1URL: https://www.lcsc.com/product-detail/Light-Emitting-Diodes-LED_XINGLIGHT-XL-1010RGBC-WS2812B_C5349953.html
footprint XL-1010RGBC-WS2812B
pins: 1 DO, 2 VDD, 3 GND, 4 DI

## XL-1608SURC-06
designator LED?, comment RED
Colorless transparence -30℃~+85℃ Positive post 617nm~621nm Red 120° 55mW 0603 Light Emitting Diodes (LED) ROHS; Manufacturer: XINGLIGHT; Manufacturer Part Number: XL-1608SURC-06; LCSC Part Number: C965799; Package: 0603; Item Type: LED; ComponentLink1Description: LCSC; ComponentLink1URL: https://www.lcsc.com/product-detail/Light-Emitting-Diodes-LED_XINGLIGHT-XL-1608SURC-06_C965799.html
footprint LED-0603
pins: 1, 2

## XL-1608SYGC-06
designator LED?, comment Green/Yellow
2800K~3160K Colorless transparence -30℃~+85℃ Positive post 570nm~573nm Green/Yellow-Green 120° 55mW 0603 Light Emitting Diodes (LED) ROHS; Manufacturer: XINGLIGHT; Manufacturer Part no: XL-1608SYGC-06; LCSC Part Number: C965805; Package: 0603; Item Type: LED
footprint LED-0603
pins: 1, 2

## XL-1608UBC-04
designator LED?
20mA 300mcd Colorless Transparent Lens -20℃~+85℃ Positive Stick 455nm~475nm Blue 120° 70mW 3.3V 0603 LED Indication - Discrete ROHS; Manufacturer: XINGLIGHT; Manufacturer Part Number: XL-1608UBC-04; Package: 0603; LCSC Part Number: C965807; Item Type: LED; ComponentLink1Description: LCSC; ComponentLink1URL: https://www.lcsc.com/product-detail/LED-Indication-Discrete_XINGLIGHT-XL-1608UBC-04_C965807.html?s_z=n_C965807
footprint LED-0603
pins: 1, 2

## XL-1615SURUBC
designator LED?, comment Red,Blue
20mA Colorless Transparent Lens -20℃~+85℃ Positive Stick Common Anode Red,Blue 120° 0606 LED Indication - Discrete ROHS; Manufacture Part Number: XL-1615SURUBC; Manufacturer: XINGLIGHT; Package: 0805; LCSC Part Number: C965836; ComponentLink1Description: LCSC; ComponentLink1URL: https://www.lcsc.com/product-detail/LED-Indication-Discrete_XINGLIGHT-XL-1615SURUBC_C965836.html; Item Type: LED
footprint XL-1615SURUBC
pins: 1, 2, 3, 4

## XL-2012SYGC
designator LED?, comment Green-Yellow
0805 普绿色 (Iv=26-75mcd(Typ) @IF=5mA); Manufacturer: XINGLIGHT; Manufacturer Part Number: XL-2012SYGC; Item Type: LED; Supplier: LCSC; LCSC Part Number: C965816; RoHS: No
footprint LED-0805
pins: 1, 2

## XL-2012UOC
designator LED, comment Orange
Colorless transparence -30℃~+85℃ 601nm~603nm Positive post Orange 120° 55mW 0805 Light Emitting Diodes (LED) ROHS; Manufacture Part Number: XL-2012UOC; Manufacturer: XINGLIGHT; Package: 0805; LCSC Part Number: C965813; ComponentLink1Description: LCSC; ComponentLink1URL: https://www.lcsc.com/product-detail/Light-Emitting-Diodes-LED_XINGLIGHT-XL-2012UOC_C965813.html; Item Type: LED
footprint LED-0805
pins: 1, 2

## XL-2012WWC-DS
designator LED?, comment White
1lm~2lm 2800K~3500K Yellow Positive post White light 120° 0805 Light Emitting Diodes (LED) ROHS; Manufacturer Part no:: XL-2012WWC-DS; Manufacurer: XINGLIGHT; LCSC part no: C3646928; Package: 0805
footprint LED-0805
pins: 1, 2

## XL-3528SURUBC
designator LED?
30mA Colorless transparent lens -30℃~+85℃ Positive Stick Common Anode Red,Blue 120° 90mW SMD3528 LED Indication - Discrete ROHS; Manufacturer: XINGLIGHT; Manufacturer Part Number: XL-3528SURUBC; Supplier: LCSC; LCSC Part Number: C2843811; Item Type: LED
footprint XL-3528SURUBC
pins: 1, 2, 3, 4

## XZCBD68W-2
designator LED?, comment Blue
LED BLUE CLEAR 2SMD; Manufacturer: SunLED; Manufacturer Part Number: XZCBD68W-2; Lens Color: Colorless; Luminous Intensity: 59mcd; Test Current: 20mA; Viewing Angle: 120°; Dominant Wavelength: 465nm; Forward Voltage: 3.3V; Supplier 1: Digi-Key; RoHS: Yes; Category: LEDs; Stock 1: 9545; Pricing 1: 1=0.52000, 10=0.31700, 100=0.18240, 1000=0.14276 (USD); Mount: Surface Mount; Case/Package: 0402; Color: Blue; Packaging: Tape and Reel; Lens Transparency: Clear; Length: 1mm; Width: 0.5mm; Height: 0.5mm; RoHS Compliant: Yes; ComponentLink1URL: http://www.sunledusa.com/products/spec/XZCBD68W-2.pdf?src-supplier=Digi-Key; ComponentLink1Description: http://www.sunledusa.com/products/spec/XZCBD68W-2.pdf?src-supplier=Digi-Key; ComponentLink2URL: https://www.sunledusa.com/products/spec/XZCBD68W-2.pdf?src-supplier=Digi-Key; ComponentLink2Description: https://www.sunledusa.com/products/spec/XZCBD68W-2.pdf?src-supplier=Digi-Key; Supplier Part Number 1: 1497-1392-1-ND; Item Type: LED
footprint LED-0402
pins: 1, 2

## XZMDK68W-2
designator LED?, comment Red
LED RED CLEAR CHIP SMD; Manufacturer: SunLED; Manufacturer Part Number: XZMDK68W-2; Lens Color: Colorless; Luminous Intensity: 69mcd; Test Current: 20mA; Viewing Angle: 120°; Dominant Wavelength: 630nm; Forward Voltage: 1.95V; Supplier 1: Digi-Key; Stock 1: 69539; Pricing 1: 1=0.43, 10=0.306, 100=0.136, 500=0.0952, 1000=0.0782 (USD); Mount: Surface Mount; Case/Package: 0402; Color: Red; Case Code (Metric): 1005; Case Code (Imperial): 0402; Packaging: Tape and Reel; Lens Transparency: Clear; Length: 1mm; Height: 0.6mm; Width: 0.5mm; ComponentLink1URL: http://www.sunledusa.com/products/spec/XZMDK68W-2.pdf?src-supplier=Digi-Key; ComponentLink1Description: http://www.sunledusa.com/products/spec/XZMDK68W-2.pdf?src-supplier=Digi-Key; ComponentLink2URL: https://www.sunledusa.com/products/spec/XZMDK68W-2.pdf?src-supplier=Digi-Key; ComponentLink2Description: https://www.sunledusa.com/products/spec/XZMDK68W-2.pdf?src-supplier=Digi-Key; Supplier Part Number 1: 1497-1174-6-ND; Item Type: LED
footprint LED-0402
pins: 1, 2

## XZMYK68W-2
designator LED?, comment Yellow
LED YELLOW CLEAR CHIP SMD; Manufacturer: SunLED; Manufacturer Part Number: XZMYK68W-2; Lens Color: Colorless; Luminous Intensity: 148mcd; Test Current: 20mA; Viewing Angle: 120°; Dominant Wavelength: 590nm; Forward Voltage: 2V; Supplier 1: Digi-Key; RoHS: Yes; Category: LEDs; Stock 1: 36021; Pricing 1: 1=0.36000, 10=0.28400, 100=0.12770, 500=0.11536, 1000=0.09476 (USD); Mount: Surface Mount; Case/Package: 0402; Color: Yellow; Case Code (Metric): 1005; Case Code (Imperial): 0402; Packaging: Tape and Reel; Lens Transparency: Clear; Length: 1mm; Width: 0.5mm; Height: 0.6mm; RoHS Compliant: Yes; ComponentLink1URL: http://www.sunledusa.com/products/spec/XZMYK68W-2.pdf?src-supplier=Digi-Key; ComponentLink1Description: http://www.sunledusa.com/products/spec/XZMYK68W-2.pdf?src-supplier=Digi-Key; Supplier Part Number 1: 1497-1198-1-ND; Item Type: LED
footprint LED-0402
pins: 1, 2

## XZVG68W-2
designator LED?
LED GREEN CLEAR CHIP SMD; Manufacturer: SunLED; Manufacturer Part Number: XZVG68W-2; Lens Color: Colorless; Luminous Intensity: 49mcd; Test Current: 20mA; Viewing Angle: 120°; Dominant Wavelength: 570nm; Forward Voltage: 2.1V; Supplier 1: Digi-Key; Stock 1: 4185; Pricing 1: 1=0.5, 10=0.36, 100=0.16, 500=0.112, 1000=0.092 (USD); Mount: Surface Mount; Case/Package: 0402; Color: Green; Case Code (Metric): 1005; Case Code (Imperial): 0402; Packaging: Tape and Reel; Lens Transparency: Clear; Length: 1mm; Height: 0.6mm; Width: 0.5mm; ComponentLink1URL: http://www.sunledusa.com/products/spec/XZVG68W-2.pdf?src-supplier=Digi-Key; ComponentLink1Description: http://www.sunledusa.com/products/spec/XZVG68W-2.pdf?src-supplier=Digi-Key; ComponentLink2URL: https://www.sunledusa.com/products/spec/XZVG68W-2.pdf?src-supplier=Digi-Key; ComponentLink2Description: https://www.sunledusa.com/products/spec/XZVG68W-2.pdf?src-supplier=Digi-Key; Supplier Part Number 1: 1497-1219-6-ND; Item Type: LED
footprint LED-0402
pins: 1, 2